# Altium schematic symbol library BaseStation_1.SCHLIB: 202 symbols (part 2 of 2)
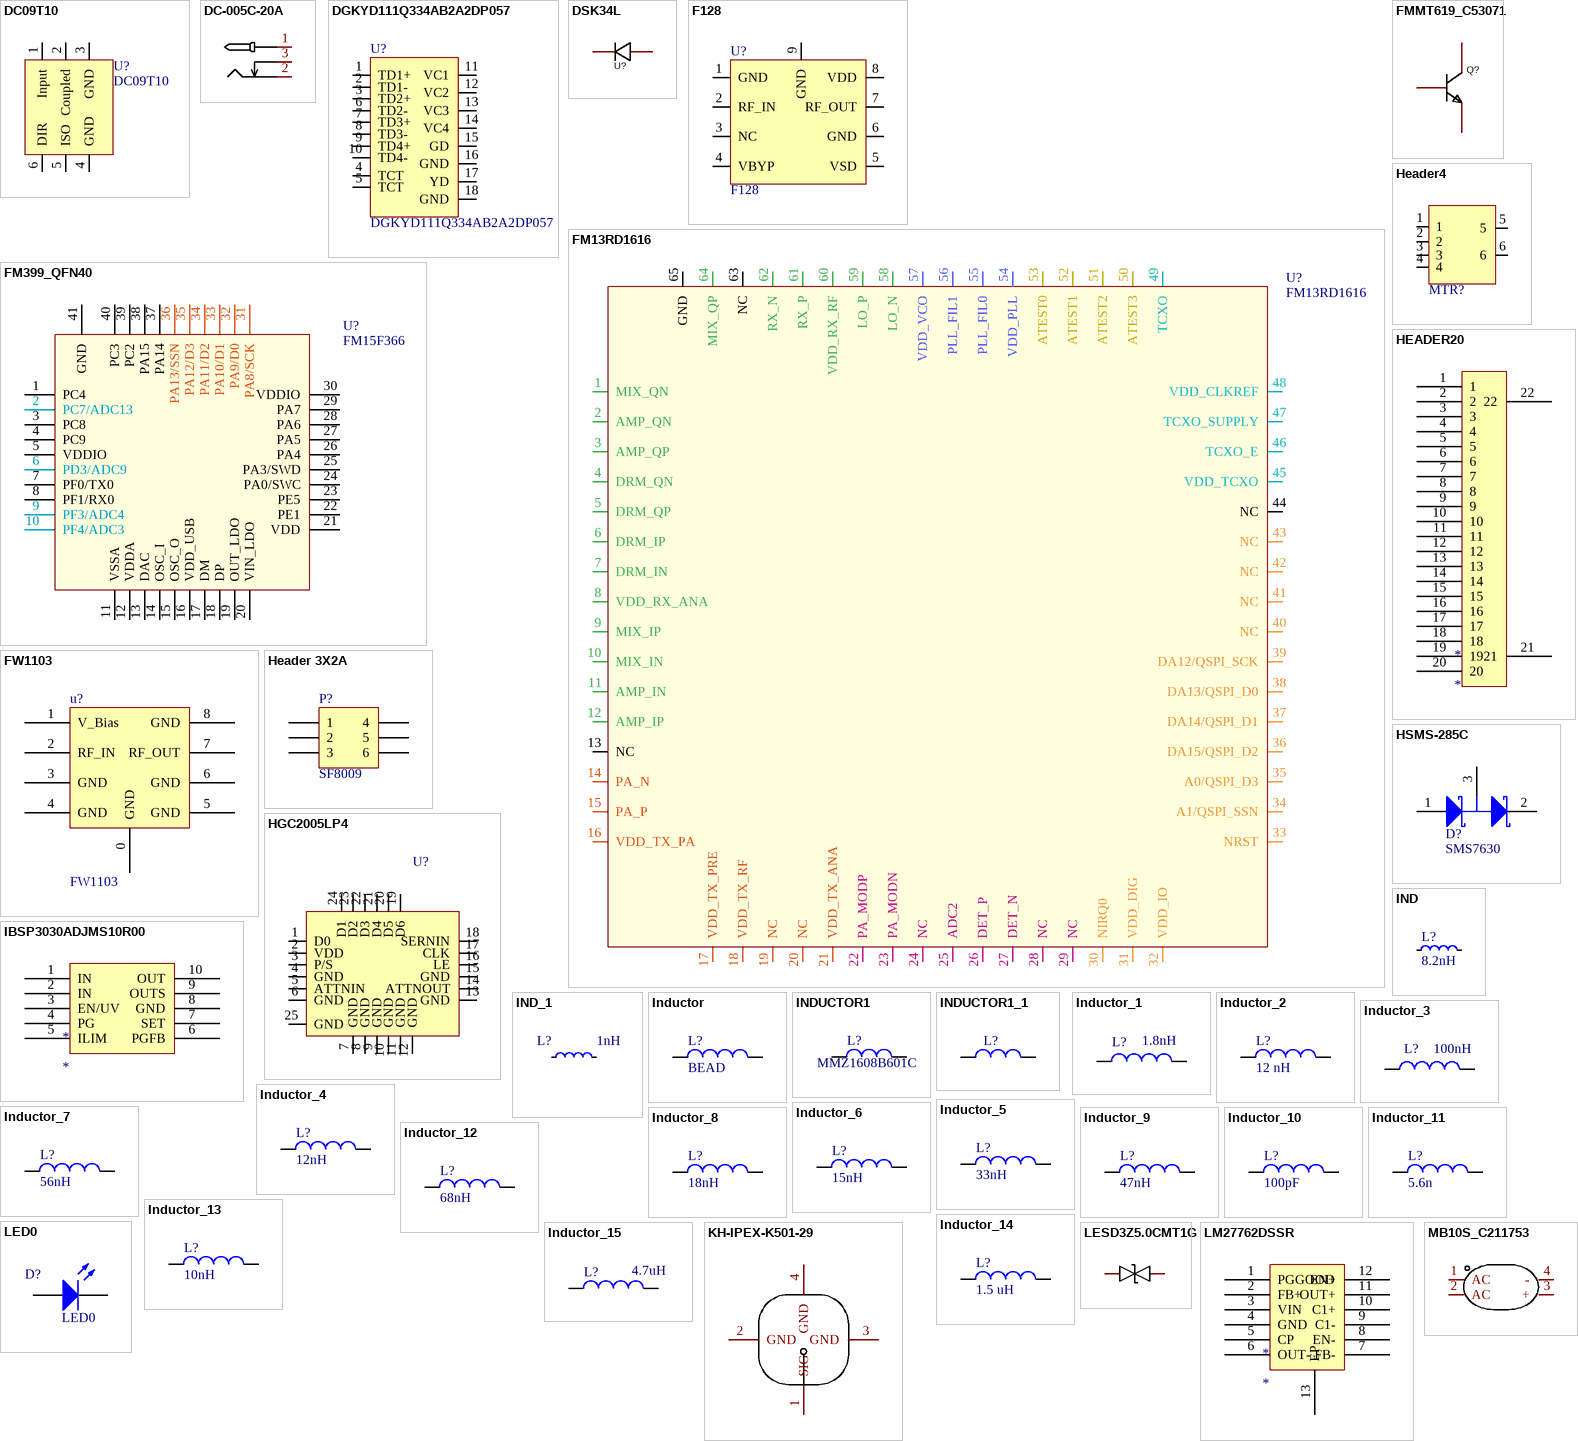
[diagram p6: symbols DC09T10 to MB10S_C211753]

## LESD3Z5.0CMT1G
designator D?  (value not drawn)
Manufacturer: LRC(乐山无线电); Add into BOM: yes; Name: LESD3Z5.0CMT1G; Symbol: LESD3Z5.0CMT1G; Device: LESD3Z5.0CMT1G; LCSC Part Name: LESD3Z5.0CMT1G; Supplier Part: C172405; Manufacturer Part: LESD3Z5.0CMT1G; Supplier Footprint: SOD-323; JLCPCB Part Class: Extended Part; Datasheet: https://atta.szlcsc.com/upload/public/pdf/source/20180130/C172405_15172974194641323435.pdf; Supplier: LCSC; Convert to PCB: yes
footprint SOD-323_L1.8-W1.3-LS2.5-BI
3D model SOD-323_L1.7-W1.3-H1.1-LS2.5
pins: 1, 2

## LM27762DSSR
designator *
pins: 1 PGGOOD, 2 FB+, 3 VIN, 4 GND, 5 CP, 6 OUT-, 7 FB-, 8 EN-, 9 C1-, 10 C1+, 11 OUT+, 12 EN+, 13 EP

## MB10S_C211753
designator D?  (value not drawn)
Manufacturer: YANGJIE(扬杰); Name: MB10S; Add into BOM: yes; Reverse Voltage (Vr): 1kV; Average Rectified Current (Io): 800mA; Forward Voltage (Vf@If): 1V@400mA; Reverse Leakage Current (Ir): 5uA@1kV; Peak Forward Surge Current: 30A; Symbol: MB10S_C211753; Device: MB10S_C211753; LCSC Part Name: 1kV 800mA; Supplier Part: C211753; Manufacturer Part: MB10S; Supplier Footprint: MBS; JLCPCB Part Class: Extended Part; Datasheet: https://atta.szlcsc.com/upload/public/pdf/source/20180504/C211753_5DD01A6B0C972FA87F6626A28935872E.pdf; Supplier: LCSC; Convert to PCB: yes; Operating Temperature: -55℃~+150℃@(Tj)
footprint MBS_L4.7-W4.0-P2.50-LS7.0-BL
3D model MBS_L4.7-W4.0-H2.5-LS7.0
pins: 1 AC, 2 AC, 3 +, 4 -

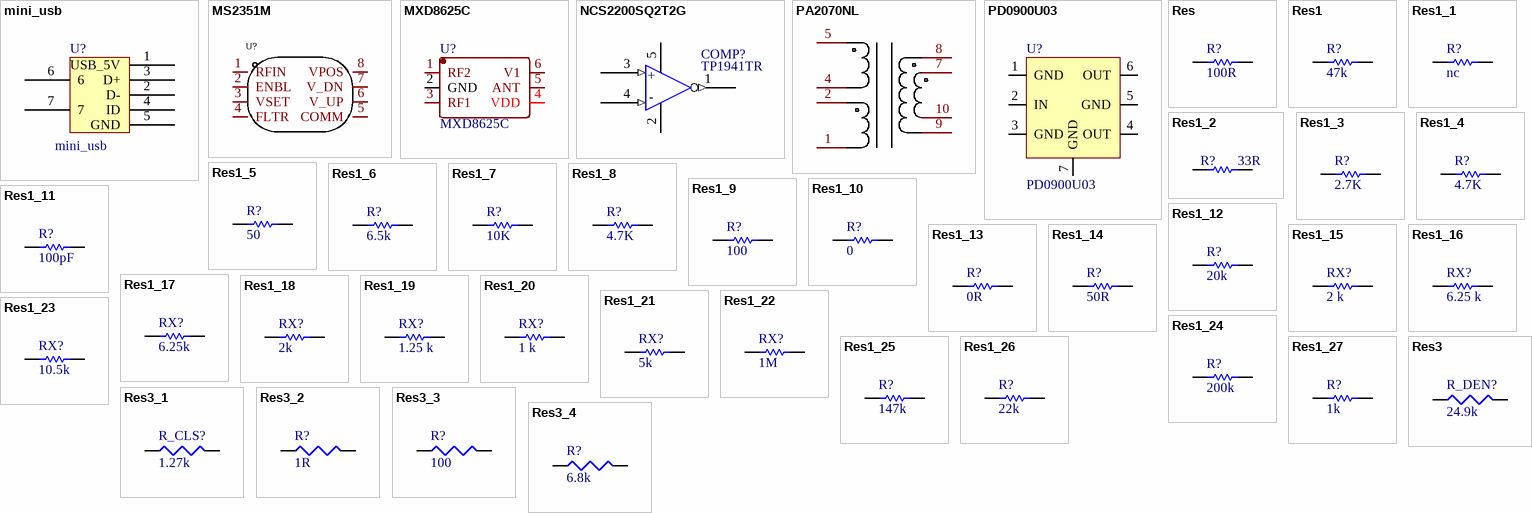
[diagram p3: symbols mini_usb to Res3_4]

## mini_usb
designator U?
footprint mini_usb
footprint MICRO-USB-SMD_MINI5P
pins: 1 USB_5V, 2 D-, 3 D+, 4 ID, 5 GND, 6, 7

## MS2351M
designator U?  (value not drawn)
Manufacturer: 杭州瑞盟; Symbol: MS2351; Add into BOM: yes; Name: MS2351M; Device: MS2351M; LCSC Part Name: MS2351M; Supplier Part: C1509084; Manufacturer Part: MS2351M; Supplier Footprint: MSOP-8; JLCPCB Part Class: Extended Part; Datasheet: https://atta.szlcsc.com/upload/public/pdf/source/20201221/C1509084_D980DDA325D6CD8A9ADBC0470C8A29D7.pdf; Supplier: LCSC; Convert to PCB: yes; Amplifier Type: -; Number of Circuits: -; -3db Bandwidth（G=1）: -; Current - Input Bias（Ib）: -; Voltage - Input Offset（Vos）: -; Gain Bandwidth Product（GBP）: -; Slew Rate（SR）: -; Output Type: -; Supply Voltage（Single）: -; Iq per channel (Typ): -; Operating Temperature: -
footprint MSOP-8_L3.0-W3.0-P0.65-LS4.9-BL
3D model MSOP-8_L3.0-W3.0-H1.1-LS4.9-P0.65
pins: 1 RFIN, 2 ENBL, 3 VSET, 4 FLTR, 5 COMM, 6 V_UP, 7 V_DN, 8 VPOS

## MXD8625C
designator U?
footprint MXD8625C
pins: 1 RF2, 2 GND, 3 RF1, 4 VDD, 5 ANT, 6 V1

## NCS2200SQ2T2G
designator COMP?, comment TP1941TR
On Semi 10uA Comparator
footprint NCS2200SQ2T2G (Low Voltage Comparators)
footprint SOT-23-5
pins: 1 OUT (out) "Output", 2 Gnd (power), 3 IN+ (in) "Positive Input", 4 In- (in) "Inverting Input", 5 VDD (power)
text: +; -

## PA2070NL
designator U?, comment PA1260NL  (value not drawn)
Manufacturer: HANRUN(汉仁); Name: HR051067; Add into BOM: yes; Symbol: HR051067; Device: HR051067; LCSC Part Name: HR051067; Supplier Part: C93830; Manufacturer Part: HR051067; Supplier Footprint: SMD; JLCPCB Part Class: Extended Part; Datasheet: https://atta.szlcsc.com/upload/public/pdf/source/20170322/1490151667444.pdf; Supplier: LCSC; Convert to PCB: yes; Primary Side Voltage: -; Secondary Side Voltage: -; Output Current: -; Power: -; Primary Winding: -; Secondary Winding: -; Isolation Voltage: -
footprint YAGEO_POE
pins: 1, 2, 4, 5, 7, 8, 9, 10

## PD0900U03
designator U?
footprint PD0900U03
pins: 1 GND, 2 IN, 3 GND, 4 OUT, 5 GND, 6 OUT, 7 GND

## Res
designator R?, comment 100R
0402; Published: 8-Jun-2000; Revision: July-2002: Re-released for DXP Platform.; Publisher: Altium Limited; Value: 100R
footprint 0402_Z
pins: 1, 2
2 alternate drawings of the same symbol

## Res1
designator R?, comment 47k
Resistor; Value: 1K; Published: 8-Jun-2000; LatestRevisionDate: 17-Jul-2002; LatestRevisionNote: Re-released for DXP Platform.; PackageReference: AXIAL-0.3; Publisher: Altium Limited; PackageDescription: Axial Device, Thru-Hole; 2 Leads; 0.3 in Pin Spacing
footprint AXIAL-0.3 (Axial Device, Thru-Hole; 2 Leads; 0.3 in Pin Spacing)
simulation model RESISTOR (Resistor)
signal-integrity model Res
footprint 0402_LAB
footprint 0402_Z
pins: 1, 2

## Res1_1
designator R?, comment nc
Resistor; Value: 1K; Published: 8-Jun-2000; LatestRevisionDate: 17-Jul-2002; LatestRevisionNote: Re-released for DXP Platform.; PackageReference: AXIAL-0.3; Publisher: Altium Limited; PackageDescription: Axial Device, Thru-Hole; 2 Leads; 0.3 in Pin Spacing
footprint AXIAL-0.3 (Axial Device, Thru-Hole; 2 Leads; 0.3 in Pin Spacing)
simulation model RESISTOR (Resistor)
signal-integrity model Res
footprint 0402_LAB
footprint 0402_Z
pins: 1, 2

## Res1_2
designator R?, comment 33R
Resistor; Published: 8-Jun-2000; Revision: July-2002: Re-released for DXP Platform.; Publisher: Altium Limited; Value: 33R
footprint LC-0603_R
footprint LC-0402_R
footprint LC-0805_R
footprint LC-0402_R_short
footprint 0402R
footprint 0402_Z
pins: 1, 2
2 alternate drawings of the same symbol

## Res1_3
designator R?, comment 2.7K
Resistor; Published: 8-Jun-2000; Revision: July-2002: Re-released for DXP Platform.; Publisher: Altium Limited; Value: 2.7K
footprint LC-0603_R
footprint LC-0402_R
footprint LC-0805_R
footprint 0402R
footprint 0402_Z
pins: 1, 2
2 alternate drawings of the same symbol

## Res1_4
designator R?, comment 4.7K
Resistor; Published: 8-Jun-2000; Revision: July-2002: Re-released for DXP Platform.; Publisher: Altium Limited; Value: 4.7K
footprint LC-0603_R
footprint LC-0402_R
footprint LC-0805_R
footprint 0402R
footprint 0402_Z
pins: 1, 2
2 alternate drawings of the same symbol

## Res1_5
designator R?, comment 50
Resistor; Value: 1K; Published: 8-Jun-2000; LatestRevisionDate: 17-Jul-2002; LatestRevisionNote: Re-released for DXP Platform.; PackageReference: AXIAL-0.3; Publisher: Altium Limited; PackageDescription: Axial Device, Thru-Hole; 2 Leads; 0.3 in Pin Spacing
footprint AXIAL-0.3 (Axial Device, Thru-Hole; 2 Leads; 0.3 in Pin Spacing)
simulation model RESISTOR (Resistor)
signal-integrity model Res
footprint 0402R
footprint 0402_Z
pins: 1, 2

## Res1_6
designator R?, comment 6.5k
Resistor; Value: 1K; Published: 8-Jun-2000; LatestRevisionDate: 17-Jul-2002; LatestRevisionNote: Re-released for DXP Platform.; PackageReference: AXIAL-0.3; Publisher: Altium Limited; PackageDescription: Axial Device, Thru-Hole; 2 Leads; 0.3 in Pin Spacing
footprint AXIAL-0.3 (Axial Device, Thru-Hole; 2 Leads; 0.3 in Pin Spacing)
simulation model RESISTOR (Resistor)
signal-integrity model Res
footprint 0402R
footprint 0402_Z
pins: 1, 2

## Res1_7
designator R?, comment 10K
Resistor; Value: 1K; Published: 8-Jun-2000; LatestRevisionDate: 17-Jul-2002; LatestRevisionNote: Re-released for DXP Platform.; PackageReference: AXIAL-0.3; Publisher: Altium Limited; PackageDescription: Axial Device, Thru-Hole; 2 Leads; 0.3 in Pin Spacing
footprint AXIAL-0.3 (Axial Device, Thru-Hole; 2 Leads; 0.3 in Pin Spacing)
simulation model RESISTOR (Resistor)
signal-integrity model Res
footprint 0402R
footprint N_0402_C
pins: 1, 2

## Res1_8
designator R?, comment 4.7K
Resistor; Value: 1K; Published: 8-Jun-2000; LatestRevisionDate: 17-Jul-2002; LatestRevisionNote: Re-released for DXP Platform.; PackageReference: AXIAL-0.3; Publisher: Altium Limited; PackageDescription: Axial Device, Thru-Hole; 2 Leads; 0.3 in Pin Spacing
footprint AXIAL-0.3 (Axial Device, Thru-Hole; 2 Leads; 0.3 in Pin Spacing)
simulation model RESISTOR (Resistor)
signal-integrity model Res
footprint 0402R
pins: 1, 2

## Res1_9
designator R?, comment 100
Resistor; Value: 1K; Published: 8-Jun-2000; LatestRevisionDate: 17-Jul-2002; LatestRevisionNote: Re-released for DXP Platform.; PackageReference: AXIAL-0.3; Publisher: Altium Limited; PackageDescription: Axial Device, Thru-Hole; 2 Leads; 0.3 in Pin Spacing
footprint AXIAL-0.3 (Axial Device, Thru-Hole; 2 Leads; 0.3 in Pin Spacing)
simulation model RESISTOR (Resistor)
signal-integrity model Res
footprint 0402R
pins: 1, 2

## Res1_10
designator R?, comment 0
Resistor; Value: 1K; Published: 8-Jun-2000; LatestRevisionDate: 17-Jul-2002; LatestRevisionNote: Re-released for DXP Platform.; PackageReference: AXIAL-0.3; Publisher: Altium Limited; PackageDescription: Axial Device, Thru-Hole; 2 Leads; 0.3 in Pin Spacing
footprint AXIAL-0.3 (Axial Device, Thru-Hole; 2 Leads; 0.3 in Pin Spacing)
simulation model RESISTOR (Resistor)
signal-integrity model Res
footprint 0402R
pins: 1, 2

## Res1_11
designator R?, comment 100pF
Resistor; Value: 1K; Published: 8-Jun-2000; LatestRevisionDate: 17-Jul-2002; LatestRevisionNote: Re-released for DXP Platform.; PackageReference: AXIAL-0.3; Publisher: Altium Limited; PackageDescription: Axial Device, Thru-Hole; 2 Leads; 0.3 in Pin Spacing
footprint AXIAL-0.3 (Axial Device, Thru-Hole; 2 Leads; 0.3 in Pin Spacing)
simulation model RESISTOR (Resistor)
signal-integrity model Res
footprint 0402R
footprint 0402_Z
pins: 1, 2

## Res1_12
designator R?, comment 20k
Resistor; Value: 1K; Published: 8-Jun-2000; LatestRevisionDate: 17-Jul-2002; LatestRevisionNote: Re-released for DXP Platform.; PackageReference: AXIAL-0.3; Publisher: Altium Limited; PackageDescription: Axial Device, Thru-Hole; 2 Leads; 0.3 in Pin Spacing
footprint AXIAL-0.3 (Axial Device, Thru-Hole; 2 Leads; 0.3 in Pin Spacing)
simulation model RESISTOR (Resistor)
signal-integrity model Res
footprint 0402R
footprint 0402_Z
pins: 1, 2

## Res1_13
designator R?, comment 0R
Resistor; Value: 1K; Published: 8-Jun-2000; LatestRevisionDate: 17-Jul-2002; LatestRevisionNote: Re-released for DXP Platform.; PackageReference: AXIAL-0.3; Publisher: Altium Limited; PackageDescription: Axial Device, Thru-Hole; 2 Leads; 0.3 in Pin Spacing
footprint AXIAL-0.3 (Axial Device, Thru-Hole; 2 Leads; 0.3 in Pin Spacing)
simulation model RESISTOR (Resistor)
signal-integrity model Res
footprint 0402R
footprint 0402_Z
pins: 1, 2

## Res1_14
designator R?, comment 50R
Resistor; Value: 1K; Published: 8-Jun-2000; LatestRevisionDate: 17-Jul-2002; LatestRevisionNote: Re-released for DXP Platform.; PackageReference: AXIAL-0.3; Publisher: Altium Limited; PackageDescription: Axial Device, Thru-Hole; 2 Leads; 0.3 in Pin Spacing
footprint AXIAL-0.3 (Axial Device, Thru-Hole; 2 Leads; 0.3 in Pin Spacing)
simulation model RESISTOR (Resistor)
signal-integrity model Res
footprint 0402R
footprint 0402_Z
pins: 1, 2

## Res1_15
designator RX?, comment 2 k
Resistor; Value: 1K; Published: 8-Jun-2000; LatestRevisionDate: 17-Jul-2002; LatestRevisionNote: Re-released for DXP Platform.; PackageReference: AXIAL-0.3; Publisher: Altium Limited; PackageDescription: Axial Device, Thru-Hole; 2 Leads; 0.3 in Pin Spacing
footprint AXIAL-0.3 (Axial Device, Thru-Hole; 2 Leads; 0.3 in Pin Spacing)
simulation model RESISTOR (Resistor)
signal-integrity model Res
footprint 0402R
footprint 0402_Z
pins: 1, 2

## Res1_16
designator RX?, comment 6.25 k
Resistor; Value: 1K; Published: 8-Jun-2000; LatestRevisionDate: 17-Jul-2002; LatestRevisionNote: Re-released for DXP Platform.; PackageReference: AXIAL-0.3; Publisher: Altium Limited; PackageDescription: Axial Device, Thru-Hole; 2 Leads; 0.3 in Pin Spacing
footprint AXIAL-0.3 (Axial Device, Thru-Hole; 2 Leads; 0.3 in Pin Spacing)
simulation model RESISTOR (Resistor)
signal-integrity model Res
footprint 0402R
footprint 0402_Z
pins: 1, 2

## Res1_17
designator RX?, comment 6.25k
Resistor; Value: 1K; Published: 8-Jun-2000; LatestRevisionDate: 17-Jul-2002; LatestRevisionNote: Re-released for DXP Platform.; PackageReference: AXIAL-0.3; Publisher: Altium Limited; PackageDescription: Axial Device, Thru-Hole; 2 Leads; 0.3 in Pin Spacing
footprint AXIAL-0.3 (Axial Device, Thru-Hole; 2 Leads; 0.3 in Pin Spacing)
simulation model RESISTOR (Resistor)
signal-integrity model Res
footprint 0402R
footprint 0402_Z
pins: 1, 2

## Res1_18
designator RX?, comment 2k
Resistor; Value: 1K; Published: 8-Jun-2000; LatestRevisionDate: 17-Jul-2002; LatestRevisionNote: Re-released for DXP Platform.; PackageReference: AXIAL-0.3; Publisher: Altium Limited; PackageDescription: Axial Device, Thru-Hole; 2 Leads; 0.3 in Pin Spacing
footprint AXIAL-0.3 (Axial Device, Thru-Hole; 2 Leads; 0.3 in Pin Spacing)
simulation model RESISTOR (Resistor)
signal-integrity model Res
footprint 0402R
footprint 0402_Z
pins: 1, 2

## Res1_19
designator RX?, comment 1.25 k
Resistor; Value: 1K; Published: 8-Jun-2000; LatestRevisionDate: 17-Jul-2002; LatestRevisionNote: Re-released for DXP Platform.; PackageReference: AXIAL-0.3; Publisher: Altium Limited; PackageDescription: Axial Device, Thru-Hole; 2 Leads; 0.3 in Pin Spacing
footprint AXIAL-0.3 (Axial Device, Thru-Hole; 2 Leads; 0.3 in Pin Spacing)
simulation model RESISTOR (Resistor)
signal-integrity model Res
footprint 0402R
footprint 0402_Z
pins: 1, 2

## Res1_20
designator RX?, comment 1 k
Resistor; Value: 1K; Published: 8-Jun-2000; LatestRevisionDate: 17-Jul-2002; LatestRevisionNote: Re-released for DXP Platform.; PackageReference: AXIAL-0.3; Publisher: Altium Limited; PackageDescription: Axial Device, Thru-Hole; 2 Leads; 0.3 in Pin Spacing
footprint AXIAL-0.3 (Axial Device, Thru-Hole; 2 Leads; 0.3 in Pin Spacing)
simulation model RESISTOR (Resistor)
signal-integrity model Res
footprint 0402R
footprint 0402_Z
pins: 1, 2

## Res1_21
designator RX?, comment 5k
Resistor; Value: 1K; Published: 8-Jun-2000; LatestRevisionDate: 17-Jul-2002; LatestRevisionNote: Re-released for DXP Platform.; PackageReference: AXIAL-0.3; Publisher: Altium Limited; PackageDescription: Axial Device, Thru-Hole; 2 Leads; 0.3 in Pin Spacing
footprint AXIAL-0.3 (Axial Device, Thru-Hole; 2 Leads; 0.3 in Pin Spacing)
simulation model RESISTOR (Resistor)
signal-integrity model Res
footprint 0402R
footprint 0402_Z
pins: 1, 2

## Res1_22
designator RX?, comment 1M
Resistor; Value: 1K; Published: 8-Jun-2000; LatestRevisionDate: 17-Jul-2002; LatestRevisionNote: Re-released for DXP Platform.; PackageReference: AXIAL-0.3; Publisher: Altium Limited; PackageDescription: Axial Device, Thru-Hole; 2 Leads; 0.3 in Pin Spacing
footprint AXIAL-0.3 (Axial Device, Thru-Hole; 2 Leads; 0.3 in Pin Spacing)
simulation model RESISTOR (Resistor)
signal-integrity model Res
footprint 0402R
footprint 0603R
pins: 1, 2

## Res1_23
designator RX?, comment 10.5k
Resistor; Value: 1K; Published: 8-Jun-2000; LatestRevisionDate: 17-Jul-2002; LatestRevisionNote: Re-released for DXP Platform.; PackageReference: AXIAL-0.3; Publisher: Altium Limited; PackageDescription: Axial Device, Thru-Hole; 2 Leads; 0.3 in Pin Spacing
footprint AXIAL-0.3 (Axial Device, Thru-Hole; 2 Leads; 0.3 in Pin Spacing)
simulation model RESISTOR (Resistor)
signal-integrity model Res
footprint 0402R
footprint 0402_Z
pins: 1, 2

## Res1_24
designator R?, comment 200k
Resistor; Value: 1K; Published: 8-Jun-2000; LatestRevisionDate: 17-Jul-2002; LatestRevisionNote: Re-released for DXP Platform.; PackageReference: AXIAL-0.3; Publisher: Altium Limited; PackageDescription: Axial Device, Thru-Hole; 2 Leads; 0.3 in Pin Spacing
footprint AXIAL-0.3 (Axial Device, Thru-Hole; 2 Leads; 0.3 in Pin Spacing)
simulation model RESISTOR (Resistor)
signal-integrity model Res
footprint 0402R
footprint 0805_Z
footprint 0603_Z
pins: 1, 2

## Res1_25
designator R?, comment 147k
Resistor; Value: 1K; Published: 8-Jun-2000; LatestRevisionDate: 17-Jul-2002; LatestRevisionNote: Re-released for DXP Platform.; PackageReference: AXIAL-0.3; Publisher: Altium Limited; PackageDescription: Axial Device, Thru-Hole; 2 Leads; 0.3 in Pin Spacing
footprint AXIAL-0.3 (Axial Device, Thru-Hole; 2 Leads; 0.3 in Pin Spacing)
simulation model RESISTOR (Resistor)
signal-integrity model Res
footprint 0402R
footprint 0805_Z
footprint 0603_Z
pins: 1, 2

## Res1_26
designator R?, comment 22k
Resistor; Value: 1K; Published: 8-Jun-2000; LatestRevisionDate: 17-Jul-2002; LatestRevisionNote: Re-released for DXP Platform.; PackageReference: AXIAL-0.3; Publisher: Altium Limited; PackageDescription: Axial Device, Thru-Hole; 2 Leads; 0.3 in Pin Spacing
footprint AXIAL-0.3 (Axial Device, Thru-Hole; 2 Leads; 0.3 in Pin Spacing)
simulation model RESISTOR (Resistor)
signal-integrity model Res
footprint 0402R
footprint 0805_Z
footprint 0603_Z
pins: 1, 2

## Res1_27
designator R?, comment 1k
Resistor; Published: 8-Jun-2000; LatestRevisionDate: 17-Jul-2002; LatestRevisionNote: Re-released for DXP Platform.; PackageReference: AXIAL-0.3; Publisher: Altium Limited; PackageDescription: Axial Device, Thru-Hole; 2 Leads; 0.3 in Pin Spacing; Value: 1K
footprint AXIAL-0.3 (Axial Device, Thru-Hole; 2 Leads; 0.3 in Pin Spacing)
simulation model RESISTOR (Resistor)
signal-integrity model Res
footprint 0402R
pins: 1, 2

## Res3
designator R_DEN?, comment 24.9k
Resistor; Published: 8-Jun-2000; LatestRevisionDate: 04-Mar-2005; LatestRevisionNote: PCB Footprint replaced.; PackageReference: J1-0603; Publisher: Altium Limited; Value: 24.9k
footprint 0402R
footprint 0603C
footprint 0603
pins: 1, 2
2 alternate drawings of the same symbol

## Res3_1
designator R_CLS?, comment 1.27k
Resistor; Published: 8-Jun-2000; LatestRevisionDate: 04-Mar-2005; LatestRevisionNote: PCB Footprint replaced.; PackageReference: J1-0603; Publisher: Altium Limited; Value: 1.27k
footprint 0402R
footprint 0402_LAB
footprint 0603
pins: 1, 2
2 alternate drawings of the same symbol

## Res3_2
designator R?, comment 1R
Resistor; Published: 8-Jun-2000; LatestRevisionDate: 04-Mar-2005; LatestRevisionNote: PCB Footprint replaced.; PackageReference: J1-0603; Publisher: Altium Limited; Value: 1R
footprint 0402R
footprint 0805C
pins: 1, 2
2 alternate drawings of the same symbol

## Res3_3
designator R?, comment 100
Resistor; Published: 8-Jun-2000; LatestRevisionDate: 04-Mar-2005; LatestRevisionNote: PCB Footprint replaced.; PackageReference: J1-0603; Publisher: Altium Limited; Value: 100
footprint 0402R
footprint 0805C
pins: 1, 2
2 alternate drawings of the same symbol

## Res3_4
designator R?, comment 6.8k
Resistor; Published: 8-Jun-2000; LatestRevisionDate: 04-Mar-2005; LatestRevisionNote: PCB Footprint replaced.; PackageReference: J1-0603; Publisher: Altium Limited; Value: 6.8k
footprint 0402R
footprint 0603
pins: 1, 2
2 alternate drawings of the same symbol

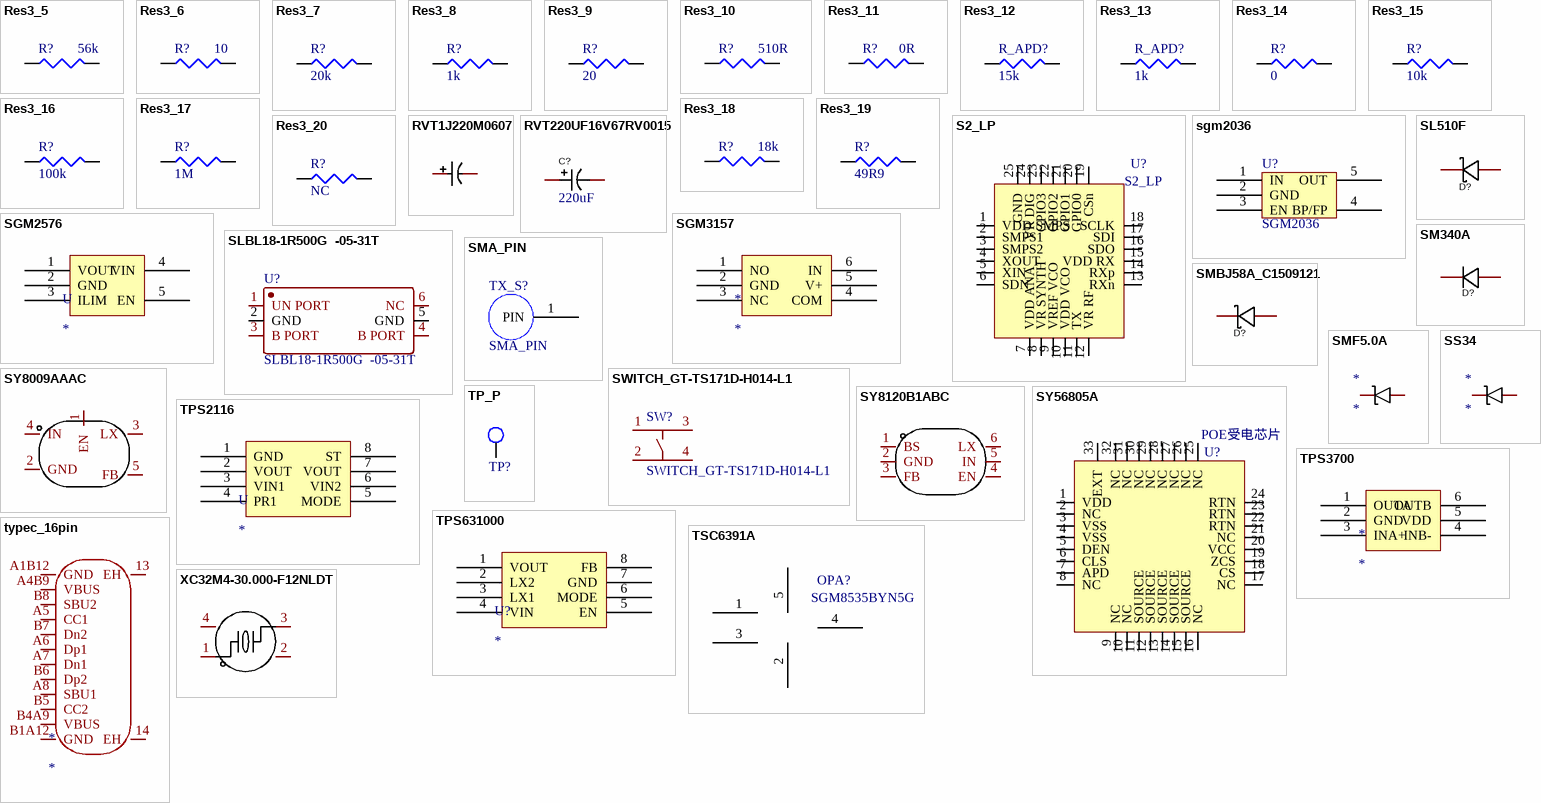
[diagram p4: symbols Res3_5 to XC32M4-30.000-F12NLDT]

## Res3_5
designator R?, comment 56k
Resistor; Published: 8-Jun-2000; LatestRevisionDate: 04-Mar-2005; LatestRevisionNote: PCB Footprint replaced.; PackageReference: J1-0603; Publisher: Altium Limited; Value: 56k
footprint 0402R
footprint 0603
pins: 1, 2
2 alternate drawings of the same symbol

## Res3_6
designator R?, comment 10
Resistor; Published: 8-Jun-2000; LatestRevisionDate: 04-Mar-2005; LatestRevisionNote: PCB Footprint replaced.; PackageReference: J1-0603; Publisher: Altium Limited; Value: 10
footprint 0402R
footprint 0603
pins: 1, 2
2 alternate drawings of the same symbol

## Res3_7
designator R?, comment 20k
Resistor; Published: 8-Jun-2000; LatestRevisionDate: 04-Mar-2005; LatestRevisionNote: PCB Footprint replaced.; PackageReference: J1-0603; Publisher: Altium Limited; Value: 20k
footprint 0603
pins: 1, 2
2 alternate drawings of the same symbol

## Res3_8
designator R?, comment 1k
Resistor; Published: 8-Jun-2000; LatestRevisionDate: 04-Mar-2005; LatestRevisionNote: PCB Footprint replaced.; PackageReference: J1-0603; Publisher: Altium Limited; Value: 1k
footprint 0402R
footprint 0603
pins: 1, 2
2 alternate drawings of the same symbol

## Res3_9
designator R?, comment 20
Resistor; Published: 8-Jun-2000; LatestRevisionDate: 04-Mar-2005; LatestRevisionNote: PCB Footprint replaced.; PackageReference: J1-0603; Publisher: Altium Limited; Value: 20
footprint 0402R
footprint 0603
pins: 1, 2
2 alternate drawings of the same symbol

## Res3_10
designator R?, comment 510R
Resistor; Published: 8-Jun-2000; LatestRevisionDate: 04-Mar-2005; LatestRevisionNote: PCB Footprint replaced.; PackageReference: J1-0603; Publisher: Altium Limited; Value: 510R
footprint 0402R
pins: 1, 2
2 alternate drawings of the same symbol

## Res3_11
designator R?, comment 0R
Resistor; Published: 8-Jun-2000; LatestRevisionDate: 04-Mar-2005; LatestRevisionNote: PCB Footprint replaced.; PackageReference: J1-0603; Publisher: Altium Limited; Value: 0R
footprint 0402R
footprint 0603
pins: 1, 2
2 alternate drawings of the same symbol

## Res3_12
designator R_APD?, comment value 15k  (hidden comment: 10k)
Resistor; Published: 8-Jun-2000; LatestRevisionDate: 04-Mar-2005; LatestRevisionNote: PCB Footprint replaced.; PackageReference: J1-0603; Publisher: Altium Limited
footprint 0402R
pins: 1, 2
2 alternate drawings of the same symbol

## Res3_13
designator R_APD?, comment value 1k  (hidden comment: 2k)
Resistor; Published: 8-Jun-2000; LatestRevisionDate: 04-Mar-2005; LatestRevisionNote: PCB Footprint replaced.; PackageReference: J1-0603; Publisher: Altium Limited
footprint 0402R
pins: 1, 2
2 alternate drawings of the same symbol

## Res3_14
designator R?, comment 0
Resistor; Published: 8-Jun-2000; LatestRevisionDate: 04-Mar-2005; LatestRevisionNote: PCB Footprint replaced.; PackageReference: J1-0603; Publisher: Altium Limited; Value: 0
footprint 0402R
pins: 1, 2
2 alternate drawings of the same symbol

## Res3_15
designator R?, comment 10k
Resistor; Published: 8-Jun-2000; LatestRevisionDate: 04-Mar-2005; LatestRevisionNote: PCB Footprint replaced.; PackageReference: J1-0603; Publisher: Altium Limited; Value: 10k
footprint 0402R
pins: 1, 2
2 alternate drawings of the same symbol

## Res3_16
designator R?, comment 100k
Resistor; Published: 8-Jun-2000; LatestRevisionDate: 04-Mar-2005; LatestRevisionNote: PCB Footprint replaced.; PackageReference: J1-0603; Publisher: Altium Limited; Value: 100k
footprint 0402R
footprint 0603
pins: 1, 2
2 alternate drawings of the same symbol

## Res3_17
designator R?, comment 1M
Resistor; Published: 8-Jun-2000; LatestRevisionDate: 04-Mar-2005; LatestRevisionNote: PCB Footprint replaced.; PackageReference: J1-0603; Publisher: Altium Limited; Value: 1M
footprint 0402R
pins: 1, 2
2 alternate drawings of the same symbol

## Res3_18
designator R?, comment 18k
Resistor; Published: 8-Jun-2000; LatestRevisionDate: 04-Mar-2005; LatestRevisionNote: PCB Footprint replaced.; PackageReference: J1-0603; Publisher: Altium Limited; Value: 18k
footprint 0402R
footprint 0402
pins: 1, 2
2 alternate drawings of the same symbol

## Res3_19
designator R?, comment 49R9
Resistor; Published: 8-Jun-2000; LatestRevisionDate: 04-Mar-2005; LatestRevisionNote: PCB Footprint replaced.; PackageReference: J1-0603; Publisher: Altium Limited; Value: 49R9
footprint 0402R
pins: 1, 2
2 alternate drawings of the same symbol

## Res3_20
designator R?, comment NC
Resistor; Published: 8-Jun-2000; LatestRevisionDate: 04-Mar-2005; LatestRevisionNote: PCB Footprint replaced.; PackageReference: J1-0603; Publisher: Altium Limited; Value: NC
footprint 0402R
pins: 1, 2
2 alternate drawings of the same symbol

## RVT1J220M0607
designator C?  (value not drawn)
Manufacturer: ROQANG(容强); Name: 22uF; Add into BOM: yes; Value: 22uF; Tolerance: ±20%; Rated Voltage: 63V; φD: 6.3mm; L: 7.7mm; Lifetime @ Temp: 2000hrs@105℃; Symbol: RVT1J220M0607; Device: RVT1J220M0607; LCSC Part Name: 22uF ±20% 63V; Supplier Part: C72501; Manufacturer Part: RVT1J220M0607; Supplier Footprint: SMD,D6.3xL7.7mm; JLCPCB Part Class: Extended Part; Datasheet: https://atta.szlcsc.com/upload/public/pdf/source/20170217/1487312289754.pdf; Supplier: LCSC; Convert to PCB: yes; Ripple Current: -; Equivalent Series Resistance(ESR): -; Operating Temperature: -45℃~+105℃
footprint CAP-SMD_BD6.3-L6.6-W6.6-LS7.3-FD
3D model CAP-SMD_BD6.3-L6.6-W6.6-LS7.3-FD
pins: 1, 2

## RVT220UF16V67RV0015
designator C?, comment 220uF
Capacitor; Manufacturer: KNSCHA(科尼盛); Symbol: RVT220UF16V67RV0015; Add into BOM: yes; Rated Voltage: 16V; Lifetime @ Temp: 2000hrs@105℃; Name: 220uF; Device: RVT220UF16V67RV0015; LCSC Part Name: 220uF 16V; Supplier Part: C2887273; Manufacturer Part: RVT220UF16V67RV0015; Supplier Footprint: SMD,D6.3xL7.7mm; JLCPCB Part Class: Extended Part; Datasheet: https://atta.szlcsc.com/upload/public/pdf/source/20210824/3DC9999D9B098FE241E3A26137981C4C.pdf; Supplier: LCSC; Convert to PCB: yes; Value: 220uF
footprint CAP-SMD_BD6.3-L6.6-W6.6-FD
3D model CAP-SMD_BD6.3-L6.6-W6.6-FD
pins: 1, 2

## S2_LP
designator U?
footprint QFN-24_L4.0-W4.0-P0.50-TL-EP2.6
pins: 1 VDD SMPS, 2 SMPS1, 3 SMPS2, 4 XOUT, 5 XIN, 6 SDN, 7 VDD ANA, 8 VR SYNTH, 9 VREF VCO, 10 VDD VCO, 11 TX, 12 VR RF, 13 RXn, 14 RXp, 15 VDD RX, 16 SDO, 17 SDI, 18 SCLK, 19 CSn, 20 GPIO0, 21 GPIO1, 22 GPIO2, 23 GPIO3, 24 VR DIG, 25 GND

## sgm2036
designator U?, comment SGM2036
footprint SOT-23-5
pins: 1 IN, 2 GND, 3 EN, 4 BP/FP, 5 OUT

## SGM2576
designator U
footprint SGM2576 (功率开关)
pins: 1 VOUT, 2 GND, 3 ILIM, 4 VIN, 5 EN

## SGM3157
designator *
pins: 1 NO, 2 GND, 3 NC, 4 COM, 5 V+, 6 IN

## SL510F
designator D?  (value not drawn)
Manufacturer: YANGJIE(扬杰); Add into BOM: yes; Reverse Voltage (Vr): 100V; Average Rectified Current (Io): 5A; Forward Voltage (Vf@If): 650mV@5A; Name: SL510F; Symbol: SL510F; Device: SL510F; LCSC Part Name: 100V 5A 650mV@5A; Supplier Part: C405311; Manufacturer Part: SL510F; Supplier Footprint: SMAF; JLCPCB Part Class: Extended Part; Datasheet: https://atta.szlcsc.com/upload/public/pdf/source/20190718/C405311_36579B27D00479E52B6D4E19B107F17C.pdf; Supplier: LCSC; Convert to PCB: yes
footprint SMAF_L3.5-W2.6-LS4.6-RD-1
3D model SMAF_L3.5-W2.6-LS4.6-RD-1
pins: 1 C, 2 A

## SLBL18-1R500G  -05-31T
designator U?
footprint SLBL18-1R500G  -05-31T
footprint Balun-0900BL15C050
pins: 1 UN PORT, 2 GND, 3 B PORT, 4 B PORT, 5 GND, 6 NC

## SM340A
designator D?  (value not drawn)
Manufacturer: LRC(乐山无线电); Add into BOM: yes; Diode Configuration: 独立式; Reverse Voltage (Vr): 40V; Average Rectified Current (Io): 3A; Forward Voltage (Vf@If): 500mV@3A; Reverse Leakage Current (Ir): 500uA@40V; Name: SM340A; Symbol: SM340A; Device: SM340A; LCSC Part Name: 40V 3A 500mV@3A; Supplier Part: C383313; Manufacturer Part: SM340A; Supplier Footprint: SMA; JLCPCB Part Class: Extended Part; Datasheet: https://atta.szlcsc.com/upload/public/pdf/source/20190920/C430843_ABED4B4F72B8684687634A838AE6AE1F.pdf; Supplier: LCSC; Convert to PCB: yes
footprint SMA_L4.4-W2.6-LS5.0-RD
3D model SMA_L4.4-W2.6-LS5.0-RD
pins: 1 C, 2 A

## SMA_PIN
designator TX_S?
footprint SMA_PIN
footprint SMA_PIN
pins: 1 PIN

## SMBJ58A_C1509121
designator D?  (value not drawn)
Manufacturer: CJ(江苏长电/长晶); Add into BOM: yes; Polarity: 单向; Reverse Stand-Off Voltage (Vrwm): 58V; Breakdown Voltage: 64.4V; Reverse Leakage Current (Ir): 5uA; Peak Pulse Current (Ipp)@10/1000μs: 6.4A; Maximum Clamping Voltage: 93.6V; Peak Pulse Power Dissipation (Ppp)@10/1000μs: 600W; Name: SMBJ58A; Symbol: SMBJ58A_C1509121; Device: SMBJ58A_C1509121; LCSC Part Name: 单向 Vrwm:58V 600W; Supplier Part: C1509121; Manufacturer Part: SMBJ58A; Supplier Footprint: SMBG; JLCPCB Part Class: Extended Part; Datasheet: https://atta.szlcsc.com/upload/public/pdf/source/20201221/C1509128_F507F34B9A82E48A0EE1CB6B55B3B924.pdf; Supplier: LCSC; Convert to PCB: yes
footprint SMB_L4.6-W3.6-LS5.3-RD
3D model SMB_L4.6-W3.6-LS5.3-RD
pins: 1 K, 2 A

## SMF5.0A
designator *
pins: 1, 2

## SS34
designator *
pins: 1, 2

## SWITCH_GT-TS171D-H014-L1
designator SW?
footprint SWITCH
footprint SWITCH
pins: 1, 2, 3, 4

## SY8009AAAC
designator U?  (value not drawn)
Manufacturer: silergy(矽力杰); Add into BOM: yes; Function: 降压型; Name: SY8009AAAC; Symbol: SY8009AAAC; Device: SY8009AAAC; LCSC Part Name: 降压型; Supplier Part: C55133; Manufacturer Part: SY8009AAAC; Supplier Footprint: SOT-23-5; JLCPCB Part Class: Extended Part; Datasheet: https://atta.szlcsc.com/upload/public/pdf/source/20161108/1478586372587.pdf; Supplier: LCSC; Convert to PCB: yes; Synchronous Rectification: -; Number of Outputs: -; Topology: -; Input Voltage: -; Output Current (Max): -; Switching Frequency: -
footprint SOT-23-5_L3.0-W1.7-P0.95-LS2.8-BR
3D model SOT-23-5_L2.9-W1.6-H1.1-LS2.8-P0.95 (PCB3D Model)
pins: 1 EN, 2 GND, 3 LX, 4 IN, 5 FB

## SY8120B1ABC
designator U?  (value not drawn)
Manufacturer: silergy(矽力杰); Add into BOM: yes; Function: 降压型; Name: SY8120B1ABC; Symbol: SY8120B1ABC; Device: SY8120B1ABC; LCSC Part Name: 降压型; Supplier Part: C88474; Manufacturer Part: SY8120B1ABC; Supplier Footprint: SOT-23-6; JLCPCB Part Class: Extended Part; Datasheet: https://atta.szlcsc.com/upload/public/pdf/source/20170329/1490752188611.pdf; Supplier: LCSC; Convert to PCB: yes; Synchronous Rectification: -; Number of Outputs: -; Topology: -; Input Voltage: -; Output Current (Max): -; Switching Frequency: -
footprint SOT-23-6_L2.9-W1.6-P0.95-LS2.8-BL
3D model SOT-23-6_L2.9-W1.6-H1.5-LS2.8-P0.95
pins: 1 BS, 2 GND, 3 FB, 4 EN, 5 IN, 6 LX

## SY56805A
designator U?, comment POE受电芯片
footprint QFN-32_L5.0-W5.0-P0.50-BL-EP3.7
pins: 1 VDD, 2 NC, 3 VSS, 4 VSS, 5 DEN, 6 CLS, 7 APD, 8 NC, 9 NC, 10 NC, 11 SOURCE, 12 SOURCE, 13 SOURCE, 14 SOURCE, 15 SOURCE, 16 NC, 17 NC, 18 CS, 19 ZCS, 20 VCC, 21 NC, 22 RTN, 23 RTN, 24 RTN, 25 NC, 26 NC, 27 NC, 28 NC, 29 NC, 30 NC, 31 NC, 32 NC, 33 EXT

## TP_P
designator TP?  (value not drawn)
footprint TP_1.0 SMT
footprint TP_H-1.27
footprint TP_0.8
footprint TP_0.8
footprint TP_0.8
pins: 1

## TPS2116
designator U
pins: 1 GND, 2 VOUT, 3 VIN1, 4 PR1, 5 MODE, 6 VIN2, 7 VOUT, 8 ST

## TPS3700
designator *
pins: 1 OUTA, 2 GND, 3 INA+, 4 INB-, 5 VDD, 6 OUTB

## TPS631000
designator U?
可以兼容国产芯片
footprint TPS631000DRLR (升降压DCDC)
pins: 1 VOUT, 2 LX2, 3 LX1, 4 VIN, 5 EN, 6 MODE, 7 GND, 8 FB

## TSC6391A
designator OPA?, comment SGM8535BYN5G
footprint SOT-23-5
pins: 1 VIP, 2 VEE, 3 VIN, 4 VOUT, 5 VCC

## typec_16pin
designator *
pins: 13 EH, 14 EH, A1B12 GND, A4B9 VBUS, A5 CC1, A6 Dp1, A7 Dn1, A8 SBU1, B1A12 GND, B4A9 VBUS, B5 CC2, B6 Dp2, B7 Dn2, B8 SBU2

## XC32M4-30.000-F12NLDT
designator X?  (value not drawn)
Manufacturer: HCI(杭晶); Name: 30MHz; Add into BOM: yes; Crystal Type: 贴片无源晶振; Value: 30MHz; Frequency Tolerance: ±10ppm; Frequency Stability: ±20ppm; Load Capacitance: 12pF; Equivalent Series Resistance (ESR): 40Ω; Symbol: XC32M4-30.000-F12NLDT; Device: XC32M4-30.000-F12NLDT; LCSC Part Name: 30MHz ±10ppm 12pF; Supplier Part: C2842277; Manufacturer Part: XC32M4-30.000-F12NLDT; Supplier Footprint: SMD3225-4P; JLCPCB Part Class: Extended Part; Datasheet: https://atta.szlcsc.com/upload/public/pdf/source/20220525/43C7A5B871DF4E364F96CDE8B1430A73.pdf; Supplier: LCSC; Convert to PCB: yes; Operating Temperature: -40℃~+85℃
footprint CRYSTAL-SMD_4P-L3.2-W2.5-BL
3D model OSC-SMD_4P-L3.2-W2.5-H1.0
pins: 1, 2 GND, 3, 4 GND

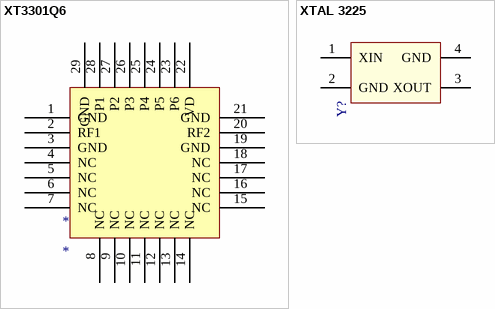
[diagram p5: symbols XT3301Q6 to XTAL 3225]

## XT3301Q6
designator *
pins: 1 GND, 2 RF1, 3 GND, 4 NC, 5 NC, 6 NC, 7 NC, 8 NC, 9 NC, 10 NC, 11 NC, 12 NC, 13 NC, 14 NC, 15 NC, 16 NC, 17 NC, 18 NC, 19 GND, 20 RF2, 21 GND, 22 VD, 23 P6, 24 P5, 25 P4, 26 P3, 27 P2, 28 P1, 29 GND

## XTAL 3225
designator Y?, comment 12MHz  (value not drawn)
PCB DECAL: 3225; Source_Path: E:\LI LELE\DESIGN KIT\DESIGN KIT_ESP8089_DEMO\ESP8089_DEMO.DSN
footprint X3225
footprint XTAL-2520
footprint XTAL_2520
pins: 1 XIN, 2 GND (power), 3 XOUT, 4 GND (power)